# Altium footprint library ClayCounter.PcbLib: 12 footprints
Each footprint in its own frame and in the unit in brackets; x right, y up, seen from the top. Pads: shape width x height; smd on the part's side, far side on the other; paste and mask are expansions set on the pad; w line width, h text height; cw(c..) or ccw(c..) is an arc to the next point about the centre after c.
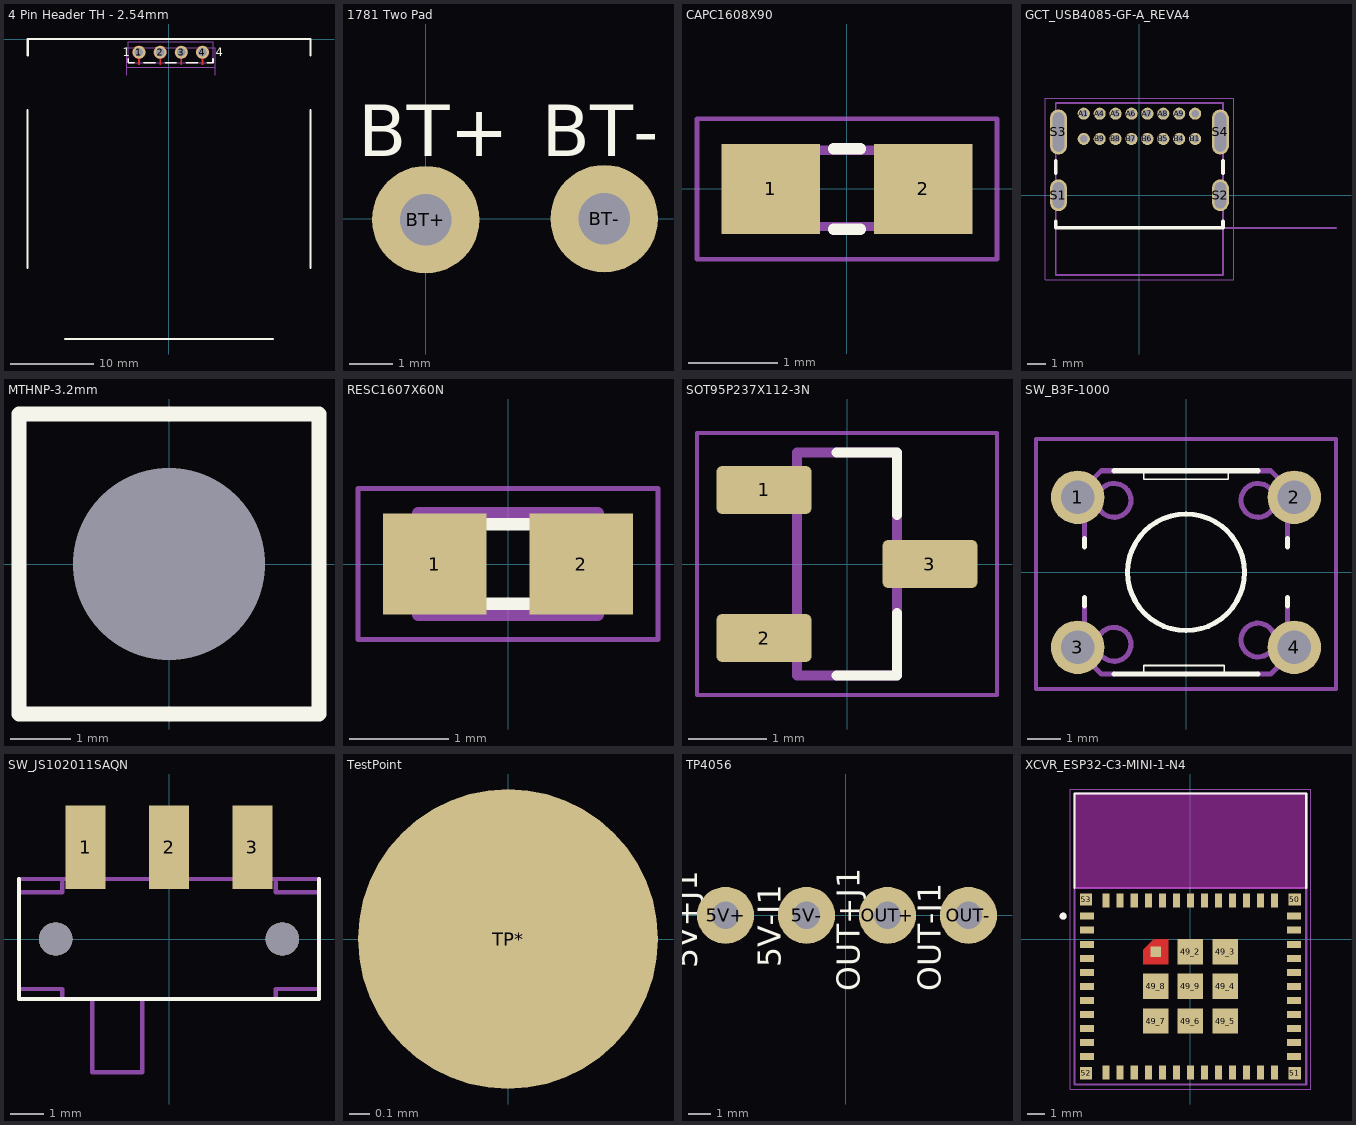
[diagram p0: the footprints below, top view; thin cyan lines are the x and y axes]

## 4 Pin Header TH - 2.54mm [mm]
pads (4):
  round 1.52 hole 1.02: 1(-3.602,-1.59) 2(-1.062,-1.59) 3(1.478,-1.59) 4(4.018,-1.59)
Top Layer:
  region: 4.097,-0.834 4.176,-0.847 4.253,-0.867 4.327,-0.896 4.398,-0.932 4.465,-0.975 4.527,-1.025 4.583,-1.081 4.633,-1.143 4.676,-1.21 4.712,-1.281 4.741,-1.355 4.761,-1.432 4.774,-1.511 4.778,-1.59 4.777,-1.628 4.774,-1.666 4.77,-1.703 4.763,-1.741 4.755,-1.777 4.745,-1.814 4.733,-1.849 4.719,-1.884 4.704,-1.919 4.687,-1.953 4.668,-1.985 4.648,-2.017 4.626,-2.048 4.603,-2.077 4.578,-2.106 4.552,-2.133 4.524,-2.159 4.495,-2.183 4.466,-2.206 4.435,-2.228 4.403,-2.248 4.37,-2.266 4.336,-2.282 4.301,-2.297 4.266,-2.311 4.23,-2.322 4.194,-2.332 4.157,-2.34 4.12,-2.346 4.083,-2.35 4.083,-3.12 3.953,-3.12 3.953,-2.35 3.916,-2.346 3.879,-2.34 3.842,-2.332 3.806,-2.322 3.77,-2.311 3.735,-2.297 3.7,-2.282 3.666,-2.266 3.633,-2.248 3.601,-2.228 3.57,-2.206 3.541,-2.183 3.512,-2.159 3.484,-2.133 3.458,-2.106 3.433,-2.077 3.41,-2.048 3.388,-2.017 3.368,-1.985 3.349,-1.953 3.332,-1.919 3.317,-1.884 3.303,-1.849 3.291,-1.814 3.281,-1.777 3.273,-1.741 3.266,-1.703 3.262,-1.666 3.259,-1.628 3.258,-1.59 3.262,-1.511 3.275,-1.432 3.295,-1.355 3.324,-1.281 3.36,-1.21 3.403,-1.143 3.453,-1.081 3.509,-1.025 3.571,-0.975 3.638,-0.932 3.709,-0.896 3.783,-0.867 3.86,-0.847 3.939,-0.834 4.018,-0.83
  region: 1.557,-0.834 1.636,-0.847 1.713,-0.867 1.787,-0.896 1.858,-0.932 1.925,-0.975 1.987,-1.025 2.043,-1.081 2.093,-1.143 2.136,-1.21 2.172,-1.281 2.201,-1.355 2.221,-1.432 2.234,-1.511 2.238,-1.59 2.237,-1.628 2.234,-1.666 2.23,-1.703 2.223,-1.741 2.215,-1.777 2.205,-1.814 2.193,-1.849 2.179,-1.884 2.164,-1.919 2.147,-1.953 2.128,-1.985 2.108,-2.017 2.086,-2.048 2.063,-2.077 2.038,-2.106 2.012,-2.133 1.984,-2.159 1.955,-2.183 1.926,-2.206 1.895,-2.228 1.863,-2.248 1.83,-2.266 1.796,-2.282 1.761,-2.297 1.726,-2.311 1.69,-2.322 1.654,-2.332 1.617,-2.34 1.58,-2.346 1.543,-2.35 1.543,-3.12 1.413,-3.12 1.413,-2.35 1.376,-2.346 1.339,-2.34 1.302,-2.332 1.266,-2.322 1.23,-2.311 1.195,-2.297 1.16,-2.282 1.126,-2.266 1.093,-2.248 1.061,-2.228 1.03,-2.206 1.001,-2.183 0.972,-2.159 0.944,-2.133 0.918,-2.106 0.893,-2.077 0.87,-2.048 0.848,-2.017 0.828,-1.985 0.809,-1.953 0.792,-1.919 0.777,-1.884 0.763,-1.849 0.751,-1.814 0.741,-1.777 0.733,-1.741 0.726,-1.703 0.722,-1.666 0.719,-1.628 0.718,-1.59 0.722,-1.511 0.735,-1.432 0.755,-1.355 0.784,-1.281 0.82,-1.21 0.863,-1.143 0.913,-1.081 0.969,-1.025 1.031,-0.975 1.098,-0.932 1.169,-0.896 1.243,-0.867 1.32,-0.847 1.399,-0.834 1.478,-0.83
  region: -0.983,-0.834 -0.904,-0.847 -0.827,-0.867 -0.753,-0.896 -0.682,-0.932 -0.615,-0.975 -0.553,-1.025 -0.497,-1.081 -0.447,-1.143 -0.404,-1.21 -0.368,-1.281 -0.339,-1.355 -0.319,-1.432 -0.306,-1.511 -0.302,-1.59 -0.303,-1.628 -0.306,-1.666 -0.31,-1.703 -0.317,-1.741 -0.325,-1.777 -0.335,-1.814 -0.347,-1.849 -0.361,-1.884 -0.376,-1.919 -0.393,-1.953 -0.412,-1.985 -0.432,-2.017 -0.454,-2.048 -0.477,-2.077 -0.502,-2.106 -0.528,-2.133 -0.556,-2.159 -0.585,-2.183 -0.614,-2.206 -0.645,-2.228 -0.677,-2.248 -0.71,-2.266 -0.744,-2.282 -0.779,-2.297 -0.814,-2.311 -0.85,-2.322 -0.886,-2.332 -0.923,-2.34 -0.96,-2.346 -0.997,-2.35 -0.997,-3.12 -1.127,-3.12 -1.127,-2.35 -1.164,-2.346 -1.201,-2.34 -1.238,-2.332 -1.274,-2.322 -1.31,-2.311 -1.345,-2.297 -1.38,-2.282 -1.414,-2.266 -1.447,-2.248 -1.479,-2.228 -1.51,-2.206 -1.539,-2.183 -1.568,-2.159 -1.596,-2.133 -1.622,-2.106 -1.647,-2.077 -1.67,-2.048 -1.692,-2.017 -1.712,-1.985 -1.731,-1.953 -1.748,-1.919 -1.763,-1.884 -1.777,-1.849 -1.789,-1.814 -1.799,-1.777 -1.807,-1.741 -1.814,-1.703 -1.818,-1.666 -1.821,-1.628 -1.822,-1.59 -1.818,-1.511 -1.805,-1.432 -1.785,-1.355 -1.756,-1.281 -1.72,-1.21 -1.677,-1.143 -1.627,-1.081 -1.571,-1.025 -1.509,-0.975 -1.442,-0.932 -1.371,-0.896 -1.297,-0.867 -1.22,-0.847 -1.141,-0.834 -1.062,-0.83
  region: -3.523,-0.834 -3.444,-0.847 -3.367,-0.867 -3.293,-0.896 -3.222,-0.932 -3.155,-0.975 -3.093,-1.025 -3.037,-1.081 -2.987,-1.143 -2.944,-1.21 -2.908,-1.281 -2.879,-1.355 -2.859,-1.432 -2.846,-1.511 -2.842,-1.59 -2.843,-1.628 -2.846,-1.666 -2.85,-1.703 -2.857,-1.741 -2.865,-1.777 -2.875,-1.814 -2.887,-1.849 -2.901,-1.884 -2.916,-1.919 -2.933,-1.953 -2.952,-1.985 -2.972,-2.017 -2.994,-2.048 -3.017,-2.077 -3.042,-2.106 -3.068,-2.133 -3.096,-2.159 -3.125,-2.183 -3.154,-2.206 -3.185,-2.228 -3.217,-2.248 -3.25,-2.266 -3.284,-2.282 -3.319,-2.297 -3.354,-2.311 -3.39,-2.322 -3.426,-2.332 -3.463,-2.34 -3.5,-2.346 -3.537,-2.35 -3.537,-3.12 -3.667,-3.12 -3.667,-2.35 -3.704,-2.346 -3.741,-2.34 -3.778,-2.332 -3.814,-2.322 -3.85,-2.311 -3.885,-2.297 -3.92,-2.282 -3.954,-2.266 -3.987,-2.248 -4.019,-2.228 -4.05,-2.206 -4.079,-2.183 -4.108,-2.159 -4.136,-2.133 -4.162,-2.106 -4.187,-2.077 -4.21,-2.048 -4.232,-2.017 -4.252,-1.985 -4.271,-1.953 -4.288,-1.919 -4.303,-1.884 -4.317,-1.849 -4.329,-1.814 -4.339,-1.777 -4.347,-1.741 -4.354,-1.703 -4.358,-1.666 -4.361,-1.628 -4.362,-1.59 -4.358,-1.511 -4.345,-1.432 -4.325,-1.355 -4.296,-1.281 -4.26,-1.21 -4.217,-1.143 -4.167,-1.081 -4.111,-1.025 -4.049,-0.975 -3.982,-0.932 -3.911,-0.896 -3.837,-0.867 -3.76,-0.847 -3.681,-0.834 -3.602,-0.83
Top Overlay:
  lines w0.2: -4.872,-2.395 -4.872,-2.835 -4.207,-2.835 ; -2.997,-2.835 -1.667,-2.835 ; -0.457,-2.835 0.873,-2.835 ; 2.083,-2.835 3.413,-2.835 ; 4.623,-2.835 5.288,-2.835 5.288,-2.395
  lines w0.25: -16.95,-1.95 -16.95,0
  lines w0.254: -17,-27.5 -17,-8.5 ; -16.95,0 17,0 17,-2 ; -12.5,-36 12.5,-36 ; 17,-27.5 17,-8.5
  text "4" at 5.633,-2.09 h1
  text "1" at -5.567,-2.065 h1
  text ".Designator" at -4.85,0.483 h1
Top Paste:
  region: 5.098,-2.045 4.638,-2.045 4.273,-2.36 4.273,-3.12 3.763,-3.12 3.763,-2.36 3.398,-2.045 2.938,-2.045 2.938,-0.505 5.098,-0.505
  region: 2.558,-2.045 2.098,-2.045 1.733,-2.36 1.733,-3.12 1.223,-3.12 1.223,-2.36 0.858,-2.045 0.398,-2.045 0.398,-0.505 2.558,-0.505
  region: 0.018,-2.045 -0.442,-2.045 -0.807,-2.36 -0.807,-3.12 -1.317,-3.12 -1.317,-2.36 -1.682,-2.045 -2.142,-2.045 -2.142,-0.505 0.018,-0.505
  region: -2.522,-2.045 -2.982,-2.045 -3.347,-2.36 -3.347,-3.12 -3.857,-3.12 -3.857,-2.36 -4.222,-2.045 -4.682,-2.045 -4.682,-0.505 -2.522,-0.505
Top Solder:
  drawing of 4 lines, arcs and shapes, not listed
Mechanical 13:
  lines w0.1: -4.872,-2.835 -4.872,-0.345 5.288,-0.345 5.288,-2.835 -4.872,-2.835
Mechanical 15:
  lines w0.05: -5.122,-3.37 5.538,-3.37 ; -5.091,-4.345 -5.091,-1.07 5.569,-1.07 5.569,-4.345

## 1781 Two Pad [mm]
pads (2):
  round 2.5 hole 1.2: BT+(0,-0.025) BT-(4.15,0)
Top Overlay:
  text "BT+" at -1.575,1.45 h1.2
  text "BT-" at 2.7,1.45 h1.2

## CAPC1608X90 [mm] "For 0603 Capacitors"
pads (2):
  rect 1.1x1 smd: 1(-0.85,0) 2(0.85,0)
Top Overlay:
  lines w0.127: -0.15,-0.45 0.15,-0.45 ; -0.15,0.45 0.15,0.45
  text ".Designator" at -1.425,1.108 h1
Mechanical 13:
  region: -0.338,-0.47 -0.839,-0.47 -0.839,0.48 -0.338,0.48
  region: 0.83,-0.471 0.331,-0.471 0.331,0.48 0.83,0.48
  lines w0.102: -0.356,-0.419 0.356,-0.419 ; -0.356,0.432 0.356,0.432
Mechanical 15:
  lines w0.051: -1.673,-0.783 1.673,-0.783 1.673,0.783 -1.673,0.783 -1.673,-0.783
3D body "step_temp.STEP": height 0.95, standoff 0, extent -0.8,-0.4 0.8,0.4

## GCT_USB4085-GF-A_REVA4 [mm]
height 3.46
pads (20):
  round 0.65 hole 0.4: A1(-2.975,4.36) A4(-2.125,4.36) A5(-1.275,4.36) A6(-0.425,4.36) A7(0.425,4.36) A8(1.275,4.36) A9(2.125,4.36) A12(2.975,4.36) B1(2.975,3.01) B4(2.125,3.01) B5(1.275,3.01) B6(0.425,3.01) B7(-0.425,3.01) B8(-1.275,3.01) B9(-2.125,3.01) B12(-2.975,3.01)
  oval 0.9x1.7 hole 0.6 slot 1.4 at 90 deg: S1(-4.325,0) S2(4.325,0)
  oval 0.9x2.4 hole 0.6 slot 2.1 at 90 deg: S3(-4.325,3.38) S4(4.325,3.38)
Top Overlay:
  lines w0.2: -4.47,-1.39 -4.47,-1.74 4.47,-1.74 4.47,-1.39 ; -4.47,1.17 -4.47,1.85 ; 4.47,1.17 4.47,1.85
  text ".Designator" at -4.9,5.408 h1
Mechanical 13:
  lines w0.1: 10.5,-1.74 -4.47,-1.74 ; -4.47,-1.74 -4.47,4.92 4.47,4.92 4.47,-4.25 -4.47,-4.25 -4.47,-1.74
  text "PCB EDGE" at 5.315,-1.57 h0.81
Mechanical 15:
  lines w0.05: -5.025,-4.5 -5.025,5.17 5.025,5.17 5.025,-4.5 -5.025,-4.5
3D body "step_temp.STEP": height 3.46, standoff -2.1, extent -4.47,-4.25 4.47,4.92

## MTHNP-3.2mm [mm] "Mounting Hole Non-Plated 3.2mm Drill"
pads (1):
  round 1 hole 3.2: ""(0,0)
Top Overlay:
  lines w0.25: -2.5,-2.5 -2.5,-0.75 -2.5,2.5 2.5,2.5 2.5,-2.5 -2.5,-2.5

## RESC1607X60N [mm] "For 0603 Resistors"
pads (2):
  rect 1.04x1.02 smd: 1(-0.735,0) 2(0.735,0)
Top Overlay:
  lines w0.127: -0.2,-0.4 0.2,-0.4 ; -0.2,0.4 0.2,0.4
  text ".Designator" at -1.275,1.083 h1
Mechanical 13:
  lines w0.127: -0.9,-0.51 0.9,-0.51 0.9,0.51 -0.9,0.51 -0.9,-0.51
Mechanical 15:
  lines w0.05: -1.508,-0.761 1.508,-0.761 1.508,0.761 -1.508,0.761 -1.508,-0.761
3D body "step_temp.STEP": height 0.55, standoff 0, extent -0.8,-0.4 0.8,0.4

## SOT95P237X112-3N [mm] "For: MCP1700T-3302E/TT"
height 1.12
pads (3):
  rrect25% 1.22x0.62 smd: 1(-1.065,0.95) 2(-1.065,-0.95) 3(1.065,0)
Top Overlay:
  lines w0.127: -0.135,-1.43 0.64,-1.43 0.64,-0.63 ; -0.135,1.43 0.64,1.43 0.64,0.63
  text ".Designator" at -1.425,1.958 h1
Mechanical 13:
  lines w0.127: -0.64,-1.43 -0.64,1.43 0.64,1.43 0.64,-1.43 -0.64,-1.43
Mechanical 15:
  lines w0.05: -1.925,-1.68 1.925,-1.68 1.925,1.68 -1.925,1.68 -1.925,-1.68
3D body "step_temp.STEP": height 1.12, standoff 0, extent -1.185,-1.45 1.185,1.45

## SW_B3F-1000 [mm]
pads (4):
  round 1.6 hole 1: 1(-3.25,2.25) 2(3.25,2.25) 3(-3.25,-2.25) 4(3.25,-2.25)
Top Overlay:
  circle w0.152: c0,0 r1.75
  lines w0.051: -1.27,-3.048 -1.27,-2.794 1.143,-2.794 1.143,-3.048 ; -1.27,3.048 -1.27,2.794 1.27,2.794 1.27,3.048
  lines w0.152: -3.048,-1.016 -3.048,-0.762 ; -3.048,0.762 -3.048,1.016 ; -2.159,-3.048 -1.27,-3.048 1.143,-3.048 2.159,-3.048 ; -2.159,3.048 -1.27,3.048 1.27,3.048 2.159,3.048 ; 3.048,-1.016 3.048,-0.762 ; 3.048,0.762 3.048,1.016
  text ".Designator" at -3.825,3.608 h1
Mechanical 13:
  circle w0.152: c-2.159,2.159 r0.508
  circle w0.152: c2.159,2.159 r0.508
  circle w0.152: c2.159,-2.032 r0.508
  circle w0.152: c-2.159,-2.159 r0.508
  lines w0.152: -3.048,-1.016 -3.048,-2.54 -2.54,-3.048 -2.159,-3.048 ; -3.048,1.016 -3.048,2.54 -2.54,3.048 -2.159,3.048 ; 2.159,-3.048 2.54,-3.048 3.048,-2.54 3.048,-1.016 ; 2.159,3.048 2.54,3.048 3.048,2.54 3.048,1.016
Mechanical 15:
  lines w0.127: -4.5,-3.5 -4.5,4 4.5,4 4.5,-3.5 -4.5,-3.5
3D body "step_temp.STEP": height 4.3, standoff -3.5, extent -3.85,-3 3.85,3

## SW_JS102011SAQN [mm]
pads (5):
  rect 1.2x2.5 smd: 1(-2.5,2.75) 2(0,2.75) 3(2.5,2.75)
  round 1 hole 1 unplated: ""(-3.4,0) ""(3.4,0)
Top Overlay:
  lines w0.127: -4.5,1.8 -4.5,-1.8 4.5,-1.8 4.5,1.8
  text ".Designator" at -4.295,4.293 h1
Mechanical 13:
  region: -2.2,1.801 -2.801,1.801 -2.801,3.7 -2.2,3.7
  region: -2.2,1.801 -2.801,1.801 -2.801,3.7 -2.2,3.7
  region: 0.3,1.8 -0.3,1.8 -0.3,3.7 0.3,3.7
  region: 2.8,1.803 2.204,1.803 2.204,3.7 2.8,3.7
  lines w0.127: -4.5,-1.5 -3.2,-1.5 -3.2,-1.8 ; -4.5,1.4 -3.2,1.4 -3.2,1.7 ; -4.5,1.8 4.5,1.8 ; -2.3,-1.8 -2.3,-4 -0.8,-4 -0.8,-1.8 ; 3.2,-1.8 3.2,-1.5 4.5,-1.5 ; 3.2,1.7 3.2,1.4 4.5,1.4
3D body "step_temp.STEP": height 3.22, standoff -1.08, extent -4.5,-3.75 4.5,3.75

## TestPoint [mm]
pads (1):
  round 1.5 smd: TP*(0,0)
Top Overlay:
  text ".Designator" at -0.9,0.908 h1

## TP4056 [mm] "Just the pads that'll connect wire from the module itself"
pads (4):
  round 2.5 hole 1.2: 5V+(-5.275,0) 5V-(-1.725,0) OUT+(1.825,0) OUT-(5.375,0)
Top Overlay:
  text "OUT-J1" at 4.15,-3.325 h1
  text "OUT+J1" at 0.6,-3.325 h1
  text "5V-J1" at -2.85,-2.275 h1
  text "5V+J1" at -6.525,-2.325 h1
  text ".Designator" at -5.35,2.758 h1

## XCVR_ESP32-C3-MINI-1-N4 [mm]
height 2.55
pads (61):
  rect 0.8x0.4 smd: 1(-5.9,1.3) 2(-5.9,0.5) 3(-5.9,-0.3) 4(-5.9,-1.1) 5(-5.9,-1.9) 6(-5.9,-2.7) 7(-5.9,-3.5) 8(-5.9,-4.3) 9(-5.9,-5.1) 10(-5.9,-5.9) 11(-5.9,-6.7) 25(5.9,-6.7) 26(5.9,-5.9) 27(5.9,-5.1) 28(5.9,-4.3) 29(5.9,-3.5) 30(5.9,-2.7) 31(5.9,-1.9) 32(5.9,-1.1) 33(5.9,-0.3) 34(5.9,0.5) 35(5.9,1.3)
  rect 0.4x0.8 smd: 12(-4.8,-7.6) 13(-4,-7.6) 14(-3.2,-7.6) 15(-2.4,-7.6) 16(-1.6,-7.6) 17(-0.8,-7.6) 18(0,-7.6) 19(0.8,-7.6) 20(1.6,-7.6) 21(2.4,-7.6) 22(3.2,-7.6) 23(4,-7.6) 24(4.8,-7.6) 36(4.8,2.2) 37(4,2.2) 38(3.2,2.2) 39(2.4,2.2) 40(1.6,2.2) 41(0.8,2.2) 42(0,2.2) 43(-0.8,2.2) 44(-1.6,2.2) 45(-2.4,2.2) 46(-3.2,2.2) 47(-4,2.2) 48(-4.8,2.2)
  rect 0.6x0.6 smd paste-1 mask+0: 49_1(-1.975,-0.725)
  rect 1.45x1.45 smd: 49_2(0,-0.725) 49_3(1.975,-0.725) 49_4(1.975,-2.7) 49_5(1.975,-4.675) 49_6(0,-4.675) 49_7(-1.975,-4.675) 49_8(-1.975,-2.7) 49_9(0,-2.7)
  rect 0.7x0.7 smd: 50(5.95,2.25) 51(5.95,-7.65) 52(-5.95,-7.65) 53(-5.95,2.25)
Top Layer:
  region: -1.25,-1.45 -2.7,-1.45 -2.7,-0.6 -2.1,0 -1.25,0
Top Overlay:
  circle w0.2: c-7.25,1.3 r0.1
  lines w0.127: -6.6,2.92 -6.6,8.3 6.6,8.3 6.6,2.92
  text ".Designator" at -6.375,8.733 h1
Top Paste:
  region: -1.25,-1.45 -2.7,-1.45 -2.7,-0.6 -2.1,0 -1.25,0
Top Solder:
  region: -1.15,-1.55 -2.8,-1.55 -2.8,-0.56 -2.14,0.1 -1.15,0.1
Keep-Out Layer:
  region: 6.6,2.9 -6.6,2.9 -6.6,8.3 6.6,8.3
  region: 6.6,2.9 -6.6,2.9 -6.6,8.3 6.6,8.3
Mechanical 13:
  circle w0.2: c-7.25,1.3 r0.1
  lines w0.127: -6.6,2.9 6.6,2.9 ; -6.6,2.9 -6.6,8.3 6.6,8.3 6.6,2.9 ; -6.6,2.9 -6.6,-8.3 6.6,-8.3 6.6,2.9
Mechanical 15:
  lines w0.05: -6.85,-8.55 6.85,-8.55 6.85,8.55 -6.85,8.55 -6.85,-8.55